# EAGLE library part SGP40-D-R4 (library card_samac_3d)
Air Quality Sensors Gas Sensor 2.5k pcs IC Source: Datasheet
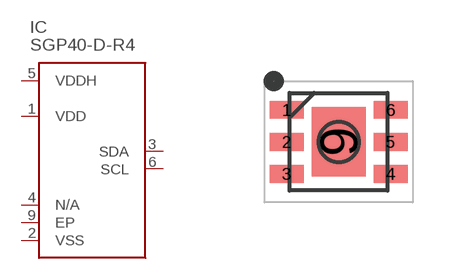
[diagram p2: symbol with the pads of SON80P244X244X95-7N; footprint SON80P244X244X95-7N]

Designator prefix IC

## SGP40-D-R4  [SON80P244X244X95-7N]
1  VDD
2  VSS
3  SDA
4  N/A
5  VDDH
6  SCL
9  EP

## Footprint SON80P244X244X95-7N (pad centres in mm)
DFN6
smd 0.85 x 0.45: 1 -1.3,0.8; 2 -1.3,0; 3 -1.3,-0.8; 4 1.3,-0.8; 5 1.3,0; 6 1.3,0.8
smd 1.35 x 1.73: 9 0,0